# Altium schematic symbol library LDC1.SCHLIB: 36 symbols
Pins are listed as number, name and electrical type; pins without a type are passive.

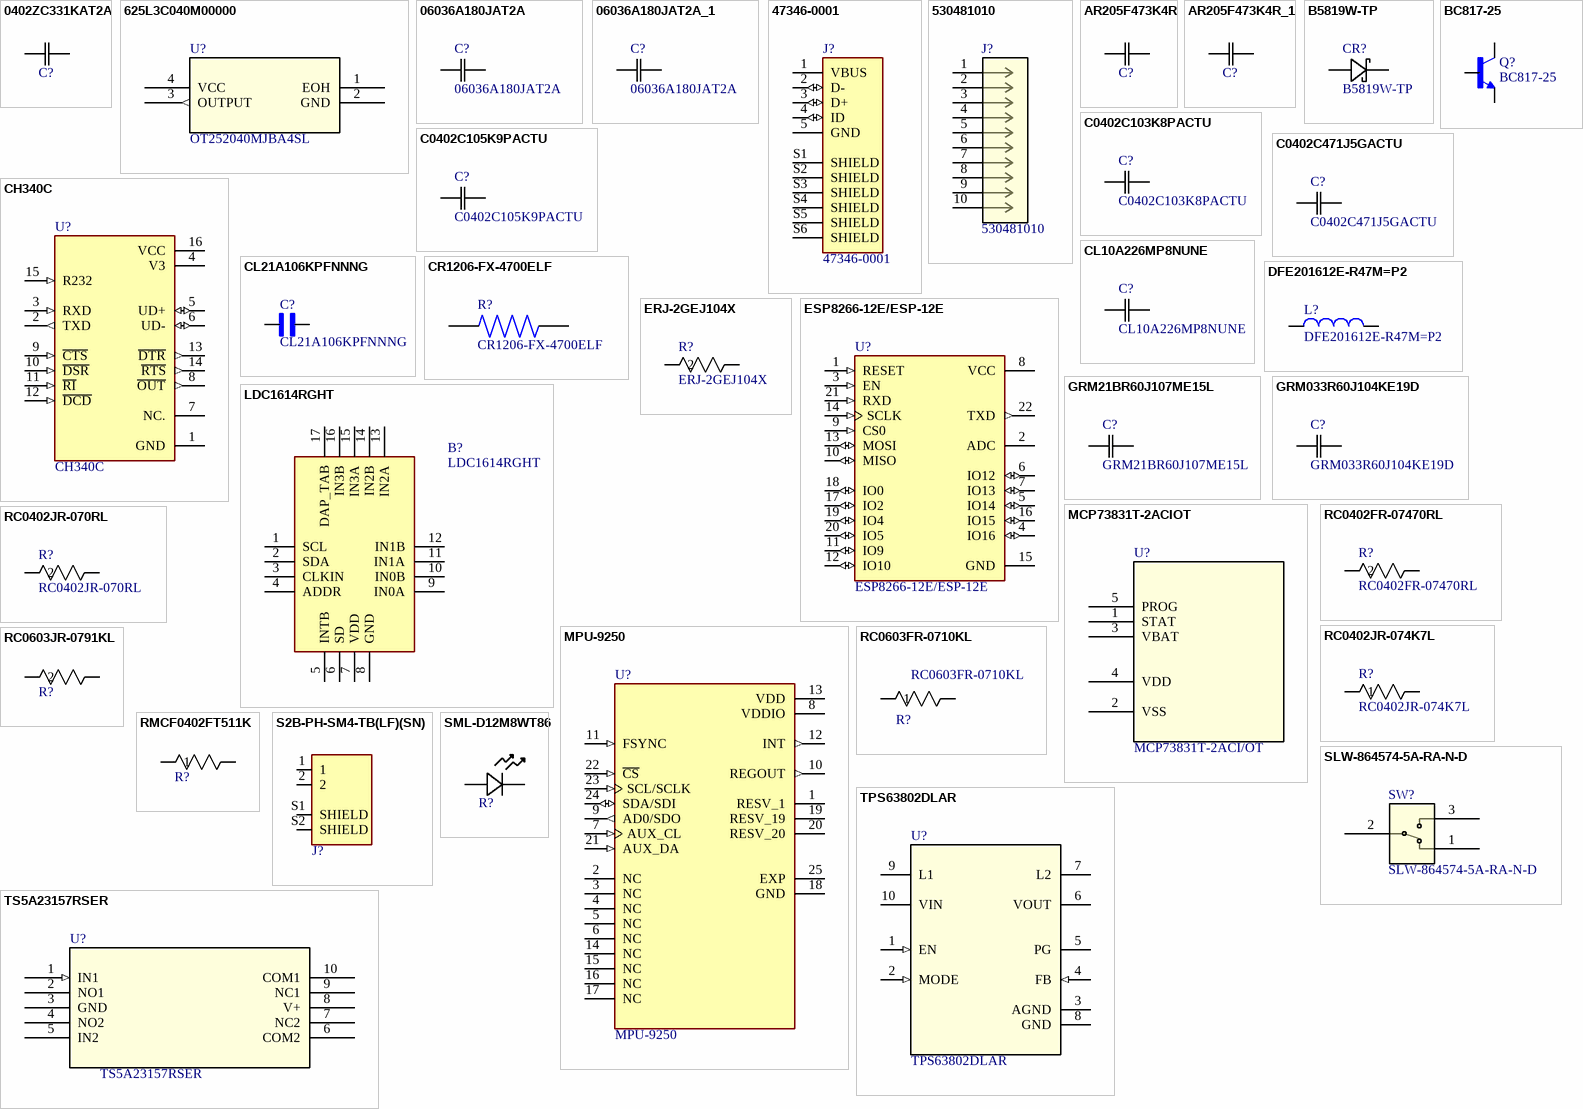
[diagram p0: symbols 0402ZC331KAT2A to TS5A23157RSER]

## 0402ZC331KAT2A
designator C?  (value not drawn)
No Description Available; Manufacturer_Name: KYOCERA AVX; Copyright: Copyright (C) 2026 Ultra Librarian. All rights reserved.; Manufacturer_Part_Number: 0402ZC331KAT2A
footprint CAP_04026Z104KAT2A
pins: 1 EPAD, 2 EPAD

## 625L3C040M00000
designator U?, comment OT252040MJBA4SL
Description; Manufacturer_Name: CTS Components; Manufacturer_Part_Number: 625L3C040M00000; Copyright: Copyright (C) 2025 Ultra Librarian. All rights reserved.; RefDes: RefDes; Type: Type
footprint IC_625L3C040M00000_CTS
footprint IC_625L3C040M00000_CTS
pins: 1 EOH, 2 GND (power), 3 OUTPUT (out), 4 VCC (power)

## 06036A180JAT2A
designator C?
18pF; Manufacturer_Name: KYOCERA AVX; Copyright: Copyright (C) 2026 Ultra Librarian. All rights reserved.; Manufacturer_Part_Number: 06036A180JAT2A
footprint CAP_06033D104JAT2A
pins: 1 EPAD, 2 EPAD

## 06036A180JAT2A_1
designator C?, comment 06036A180JAT2A
Description; Manufacturer_Name: KYOCERA AVX; Copyright: Copyright (C) 2026 Ultra Librarian. All rights reserved.; Manufacturer_Part_Number: 06036A180JAT2A
footprint CAP_06033D104JAT2A
footprint CAP_06033D104JAT2A
footprint CAP_06033D104JAT2A
pins: 1 EPAD, 2 EPAD

## 47346-0001
designator J?
Conn Data USB Micro B w/Flange SMT Bottom Mnt LF | Molex Incorporated 47346-0001; SnapEDA_Link: https://www.snapeda.com/parts/47346-0001/Molex/view-part/?ref=snap; Package: None; Value: *; MF: Molex; MP: 47346-0001; Check_prices: https://www.snapeda.com/parts/47346-0001/Molex/view-part/?ref=eda
footprint MOLEX_47346-0001
footprint WURTH_629105150921
footprint MOLEX_47346-0001
pins: 1 VBUS (power), 2 D- (io), 3 D+ (io), 4 ID (io), 5 GND (power), S1 SHIELD, S2 SHIELD, S3 SHIELD, S4 SHIELD, S5 SHIELD, S6 SHIELD

## 530481010
designator J?
1.25mm Pitch, PicoBlade PCB Header, Single Row, Right-Angle, Through Hole, Tin (Sn) Plating, Friction Lock,  10 Circuits, Tray, 2.30mm PC Tail Length; Manufacturer_Name: Molex Connector Corporation; Copyright: Copyright (C) 2025 Ultra Librarian. All rights reserved.; Manufacturer_Part_Number: 530481010; RefDes: RefDes; Type: Type
footprint CONN10_530481010_MOL
pins: 1, 2, 3, 4, 5, 6, 7, 8, 9, 10

## AR205F473K4R
designator C?  (value not drawn)
No Description Available; Manufacturer_Name: KYOCERA AVX; Copyright: Copyright (C) 2026 Ultra Librarian. All rights reserved.; Manufacturer_Part_Number: AR205F473K4R
footprint CAP_AR20_AVX
pins: 1, 2

## AR205F473K4R_1
designator C?
No Description Available; Manufacturer_Name: KYOCERA AVX; Manufacturer_Part_Number: AR205F473K4R; Copyright: Copyright (C) 2026 Ultra Librarian. All rights reserved.
footprint CAP_AR20_AVX
pins: 1, 2

## B5819W-TP
designator CR?
Description; Manufacturer_Name: MCC; Copyright: Copyright (C) 2025 Ultra Librarian. All rights reserved.; Manufacturer_Part_Number: B5819W-TP
footprint SDO_SOD-123_MCC
footprint SDO_SOD-123_MCC
pins: 1, 2

## BC817-25
designator Q?
Bipolar (BJT) Transistor NPN 45 V 500 mA 100MHz 900 mW Surface Mount DFN1010D-3; MF: Nexperia USA; SnapEDA_Link: https://www.snapeda.com/parts/BC817-25/Nexperia/view-part/?ref=snap; Package: SOT-23-3 Nexperia USA; Value: *; MP: BC817-25; Check_prices: https://www.snapeda.com/parts/BC817-25/Nexperia/view-part/?ref=eda
footprint TRANS_BC817-25
pins: 1 B, 2 E, 3 C

## C0402C103K8PACTU
designator C?
SMD Comm X5R, Ceramic, 0.01 uF, 10%, 10 VDC, X5R, SMD, MLCC, Temperature Stable, Class II, 0402; Manufacturer_Name: Kemet; Copyright: Copyright (C) 2026 Ultra Librarian. All rights reserved.; Manufacturer_Part_Number: C0402C103K8PACTU; Datasheet: https://content.kemet.com/datasheets/KEM_C1006_X5R_SMD.pdf
footprint CAPC10555_55N_KEM
footprint Model Name (Footprint not found)
footprint CAPC10555_55N_KEM-M
footprint CAPC10555_55N_KEM-M
pins: 1, 2

## C0402C105K9PACTU
designator C?
SMD Comm X5R, Ceramic, 1 uF, 10%, 6.3 VDC, X5R, SMD, MLCC, Temperature Stable, Class II, 0402; Manufacturer_Name: Kemet; Copyright: Copyright (C) 2025 Ultra Librarian. All rights reserved.; Manufacturer_Part_Number: C0402C105K9PACTU
footprint CAPC10555_55N_KEM
pins: 1, 2

## C0402C471J5GACTU
designator C?
SMD Comm C0G, Ceramic, 470 pF, 5%, 50 VDC, C0G, SMD, MLCC, Ultra-Stable, Low Loss, Class I, 0402; Manufacturer_Name: Kemet; Copyright: Copyright (C) 2025 Ultra Librarian. All rights reserved.; Manufacturer_Part_Number: C0402C471J5GACTU
footprint CAPC10555_55N_KEM
pins: 1, 2

## CH340C
designator U?
USB to serial chip CH340; MF: WCH; Price: None; Availability: Not in stock; MP: CH340C; Package: None; SnapEDA_Link: https://www.snapeda.com/parts/CH340C/WCH/view-part/?ref=snap; Check_prices: https://www.snapeda.com/parts/CH340C/WCH/view-part/?ref=eda; Value: *
footprint SOIC127P600X180-16N
footprint Model Name (Footprint not found)
footprint SOIC127P600X180-16N
footprint Model Name (Footprint not found)
footprint SOIC127P600X180-16N
pins: 1 GND (power), 2 TXD (out), 3 RXD (in), 4 V3 (power), 5 UD+ (io), 6 UD- (io), 7 NC., 8 ~{OUT} (out), 9 ~{CTS} (in), 10 ~{DSR} (in), 11 ~{RI} (in), 12 ~{DCD} (in), 13 ~{DTR} (out), 14 ~{RTS} (out), 15 R232 (in), 16 VCC (power)

## CL10A226MP8NUNE
designator C?
Description; Manufacturer_Name: Samsung; Copyright: Copyright (C) 2025 Ultra Librarian. All rights reserved.; Manufacturer_Part_Number: CL10A226MP8NUNE
footprint CAP_CL10_SAM
pins: 1, 2

## CL21A106KPFNNNG
designator C?
CL21 Series 10 uF 10 V Â±10 % Tol. X5R SMT Multilayer Ceramic Capacitor; MF: Samsung Electro-Mechanics; SnapEDA_Link: https://www.snapeda.com/parts/CL21A106KPFNNNG/Samsung/view-part/?ref=snap; Package: SMD-2 Samsung; Value: *; MP: CL21A106KPFNNNG; Check_prices: https://www.snapeda.com/parts/CL21A106KPFNNNG/Samsung/view-part/?ref=eda
footprint CAPC2012X135N
footprint CAPC2012X135N
footprint CAPC2012X135N
footprint CAPC2012X135N
pins: 1, 2

## CR1206-FX-4700ELF
designator R?
RESISTOR THICK FILM, 470 OHM, 1%, 1206; Product Range:BOURNS - CR Series; Resistance:470ohm; Power Rating:250mW; Resistance Tolerance:Â± 1%; Resistor Case Style:1206 [3216 Metric]; Resistor Element Material:Thick Film; Temperature Coefficient:Â± 100ppm/Â°; MF: Bourns; SnapEDA_Link: https://www.snapeda.com/parts/CR1206-FX-4700ELF/Bourns/view-part/?ref=snap; Package: 3216 Bourns; Value: *; MP: CR1206-FX-4700ELF; Check_prices: https://www.snapeda.com/parts/CR1206-FX-4700ELF/Bourns/view-part/?ref=eda
footprint RESC3216X75N
pins: 1, 2

## DFE201612E-R47M=P2
designator L?
Inductor with Inductance: 0.47uH Tol. +/-20%, Package: 0806 (2016); MF: Murata; Check_prices: https://www.snapeda.com/parts/DFE201612E-R47M=P2/Murata/view-part/?ref=eda; Value: *; MP: DFE201612E-R47M=P2; Purchase-URL: https://pricing.snapeda.com/search/part/DFE201612E-R47M=P2/?ref=eda; SnapEDA_Link: https://www.snapeda.com/parts/DFE201612E-R47M=P2/Murata/view-part/?ref=snap; Package: 2016 Murata; Digi-Key_Part_Number: 490-DFE201612E-R47M=P2TR-ND
footprint INDC2016X120N
footprint INDC2016X120N
pins: 1, 2

## ERJ-2GEJ104X
designator R?
RESISTOR; 0402; 100K OHM; 5%; 200PPM; 0.10W; THICK FILM; Manufacturer_Name: Panasonic; Copyright: Copyright (C) 2025 Ultra Librarian. All rights reserved.; Manufacturer_Part_Number: ERJ-2GEJ104X
footprint RC0402N_PAN
pins: 1, 2

## ESP8266-12E/ESP-12E
designator U?
This WiFi module has a 32-bit MCU micro and clock speeds supporting 80 MHz or 160 MHz. Supports the RTOS and integrated Wi-Fi MAC/BB/RF/PA/LNA, and has an on-board antenna.; MF: AI-Thinker; Value: *; SnapEDA_Link: https://www.snapeda.com/parts/ESP8266-12E/ESP-12E/AI-Thinker/view-part/?ref=snap; Availability: Not in stock; Price: None; Package: None; Check_prices: https://www.snapeda.com/parts/ESP8266-12E/ESP-12E/AI-Thinker/view-part/?ref=eda; MP: ESP8266-12E/ESP-12E
footprint Model Name (Footprint not found)
footprint Model Name (Footprint not found)
footprint Model Name (Footprint not found)
footprint XCVR_ESP8266-12E/ESP-12E
footprint Model Name (Footprint not found)
footprint XCVR_ESP8266-12E/ESP-12E
footprint XCVR_ESP8266-12E/ESP-12E
pins: 1 RESET (in), 2 ADC, 3 EN (in), 4 IO16 (io), 5 IO14 (io), 6 IO12 (io), 7 IO13 (io), 8 VCC (power), 9 CS0 (in), 10 MISO (io), 11 IO9 (io), 12 IO10 (io), 13 MOSI (io), 14 SCLK (in), 15 GND (power), 16 IO15 (io), 17 IO2 (io), 18 IO0 (io), 19 IO4 (io), 20 IO5 (io), 21 RXD (in), 22 TXD (out)

## GRM21BR60J107ME15L
designator C?
CAP CER 100UF 6.3V X5R 0805; Manufacturer_Name: Murata; Copyright: Copyright (C) 2025 Ultra Librarian. All rights reserved.; Manufacturer_Part_Number: GRM21BR60J107ME15L
footprint CAP_GRM21B_MUR
pins: 1, 2

## GRM033R60J104KE19D
designator C?
Description; Manufacturer_Name: Murata; Copyright: Copyright (C) 2025 Ultra Librarian. All rights reserved.; Manufacturer_Part_Number: GRM033R60J104KE19D
footprint G-033_MUR
pins: 1, 2

## LDC1614RGHT
designator B?
4-channel, 28-bit Inductance-to-Digital Converter with I2C for Inductive Sensing; Manufacturer_Name: Texas Instruments; Geometry.Height: 0.8mm; Utmel Part Number: *; Utmel Price/Stock: *; Manufacturer_Part_Number: LDC1614RGHT; Datasheet Link: http://www.ti.com/lit/ds/symlink/ldc1614.pdf
footprint QFN50P400X400X80-17N
pins: 1 SCL, 2 SDA, 3 CLKIN, 4 ADDR, 5 INTB, 6 SD, 7 VDD (power), 8 GND, 9 IN0A, 10 IN0B, 11 IN1A, 12 IN1B, 13 IN2A, 14 IN2B, 15 IN3A, 16 IN3B, 17 DAP_TAB

## MCP73831T-2ACIOT
designator U?, comment MCP73831T-2ACI/OT
Description; Manufacturer_Name: Microchip; Copyright: Copyright (C) 2026 Ultra Librarian. All rights reserved.; Manufacturer_Part_Number: MCP73831T-2ACI/OT; RefDes: RefDes; Type: Type
footprint SOT-23-5_MC_MCH
footprint SOT-23-5_MC_MCH
footprint SOT-23-5_MC_MCH
footprint SOT-23-5_MC_MCH-M
footprint SOT-23-5_MC_MCH
pins: 1 STAT, 2 VSS, 3 VBAT, 4 VDD, 5 PROG

## MPU-9250
designator U?
MPU-9250 series Accelerometer, Gyroscope, Humidity, Magnetometer, Pressure, Temperature Sensor Evaluation Board; MF: TDK InvenSense; SnapEDA_Link: https://www.snapeda.com/parts/MPU-9250/TDK+InvenSense/view-part/?ref=snap; Package: TFQFN-24 TDK InvenSense; Value: *; MP: MPU-9250; Check_prices: https://www.snapeda.com/parts/MPU-9250/TDK+InvenSense/view-part/?ref=eda
footprint QFN40P300X300X105-25N
footprint Model Name (Footprint not found)
footprint QFN40P300X300X105-25N.PcbLib (Footprint not found)
footprint QFN40P300X300X105-25N
pins: 1 RESV_1 (power), 2 NC, 3 NC, 4 NC, 5 NC, 6 NC, 7 AUX_CL (in), 8 VDDIO (power), 9 AD0/SDO (out), 10 REGOUT (out), 11 FSYNC (in), 12 INT (out), 13 VDD (power), 14 NC, 15 NC, 16 NC, 17 NC, 18 GND (power), 19 RESV_19, 20 RESV_20 (power), 21 AUX_DA (in), 22 ~{CS} (in), 23 SCL/SCLK (in), 24 SDA/SDI (io), 25 EXP

## RC0402FR-07470RL
designator R?
Description; Manufacturer_Name: Yageo; Copyright: Copyright (C) 2025 Ultra Librarian. All rights reserved.; Manufacturer_Part_Number: RC0402FR-07470RL
footprint RC0402N_YAG
footprint RC0402N_YAG
footprint RC0402N_YAG-M
pins: 1, 2

## RC0402JR-070RL
designator R?
RES; SMT (0402); 0; 5%; JUMPER; 0.0630W; Manufacturer_Name: Yageo; Copyright: Copyright (C) 2025 Ultra Librarian. All rights reserved.; Manufacturer_Part_Number: RC0402JR-070RL
footprint RC0402N_YAG
pins: 1, 2

## RC0402JR-074K7L
designator R?
No Description Available; Manufacturer_Name: Yageo; Copyright: Copyright (C) 2026 Ultra Librarian. All rights reserved.; Manufacturer_Part_Number: RC0402JR-074K7L
footprint RES_0402_YAG
footprint RES_0402_YAG
pins: 1, 2

## RC0603FR-0710KL
designator R?
RES SMD 10kO 1% 1/10W 0603; Manufacturer_Name: Yageo; Copyright: Copyright (C) 2025 Ultra Librarian. All rights reserved.; Manufacturer_Part_Number: RC0603FR-0710KL
footprint RC0603N_YAG
footprint Model Name (Footprint not found)
footprint RC0603N_YAG-M
pins: 1, 2

## RC0603JR-0791KL
designator R?  (value not drawn)
No Description Available; Manufacturer_Name: Yageo; Copyright: Copyright (C) 2026 Ultra Librarian. All rights reserved.; Manufacturer_Part_Number: RC0603JR-0791KL
footprint RC0603N_YAG
pins: 1, 2

## RMCF0402FT511K
designator R?  (value not drawn)
No Description Available; Manufacturer_Name: Stackpole International; Copyright: Copyright (C) 2026 Ultra Librarian. All rights reserved.; Manufacturer_Part_Number: RMCF0402FT511K
footprint RES_RMCF0402_STP
pins: 1, 2

## S2B-PH-SM4-TB(LF)(SN)
designator J?  (value not drawn)
Connector Header Surface Mount, Right Angle 2 position 0.079 (2.00mm); MF: JST Sales; Value: *; SnapEDA_Link: https://www.snapeda.com/parts/S2B-PH-SM4-TB(LF)(SN)/JST+Sales+America+Inc./view-part/?ref=snap; Purchase-URL: https://pricing.snapeda.com/search/part/S2B-PH-SM4-TB(LF)(SN)/?ref=eda; Check_prices: https://www.snapeda.com/parts/S2B-PH-SM4-TB(LF)(SN)/JST+Sales+America+Inc./view-part/?ref=eda; Digi-Key_Part_Number: 455-1749-2-ND; Package: None; MP: S2B-PH-SM4-TB(LF)(SN)
footprint JST_S2B-PH-SM4-TB(LF)(SN)
footprint JST_S2B-PH-SM4-TB(LF)(SN)
footprint JST_S2B-PH-SM4-TB(LF)(SN)
pins: 1, 2, S1 SHIELD, S2 SHIELD

## SLW-864574-5A-RA-N-D
designator SW?
Description; Manufacturer_Name: Same Sky; Copyright: Copyright (C) 2025 Ultra Librarian. All rights reserved.; Manufacturer_Part_Number: SLW-864574-5A-RA-N-D; RefDes: RefDes; Type: Type
footprint SLW-864574-5A-RA-N-D_SSD
footprint SLW-864574-5A-RA-N-D_SSD
footprint SLW-864574-5A-RA-N-D_SSD
pins: 1, 2, 3

## SML-D12M8WT86
designator R?  (value not drawn)
Description; Manufacturer_Name: ROHM Semiconductor; Copyright: Copyright (C) 2026 Ultra Librarian. All rights reserved.; Manufacturer_Part_Number: SML-D12M8WT86
footprint LED_SMLD12_ROM
pins: 1, 2

## TPS63802DLAR
designator U?
2-A, high-efficient, 11-ÂµA quiescent current buck-boost converter in QFN/DFN package 10-VSON-HR -40 to 125; Manufacturer_Name: Texas Instruments; TYPE: TYPE; RefDes: RefDes; Copyright: Copyright (C) 2025 Ultra Librarian. All rights reserved.; Manufacturer_Part_Number: TPS63802DLAR
footprint DLA0010A
pins: 1 EN (in), 2 MODE (in), 3 AGND (power), 4 FB (in), 5 PG (oc), 6 VOUT (power), 7 L2, 8 GND (power), 9 L1, 10 VIN (power)

## TS5A23157RSER
designator U?
5V, 2:1 (SPDT), 2-channel, analog switch 10-UQFN -40 to 125; Manufacturer_Name: Texas Instruments; Copyright: Copyright (C) 2026 Ultra Librarian. All rights reserved.; Manufacturer_Part_Number: TS5A23157RSER; RefDes: RefDes; Type: Type
footprint RSE10
footprint RSE10
pins: 1 IN1 (in), 2 NO1, 3 GND (power), 4 NO2, 5 IN2, 6 COM2, 7 NC2, 8 V+ (power), 9 NC1, 10 COM1